# Altium footprint library DioneyaMain.PcbLib: 29 footprints (part 1 of 2)
Each footprint in its own frame and in the unit in brackets; x right, y up, seen from the top. Pads: shape width x height; smd on the part's side, far side on the other; paste and mask are expansions set on the pad; w line width, h text height; cw(c..) or ccw(c..) is an arc to the next point about the centre after c.
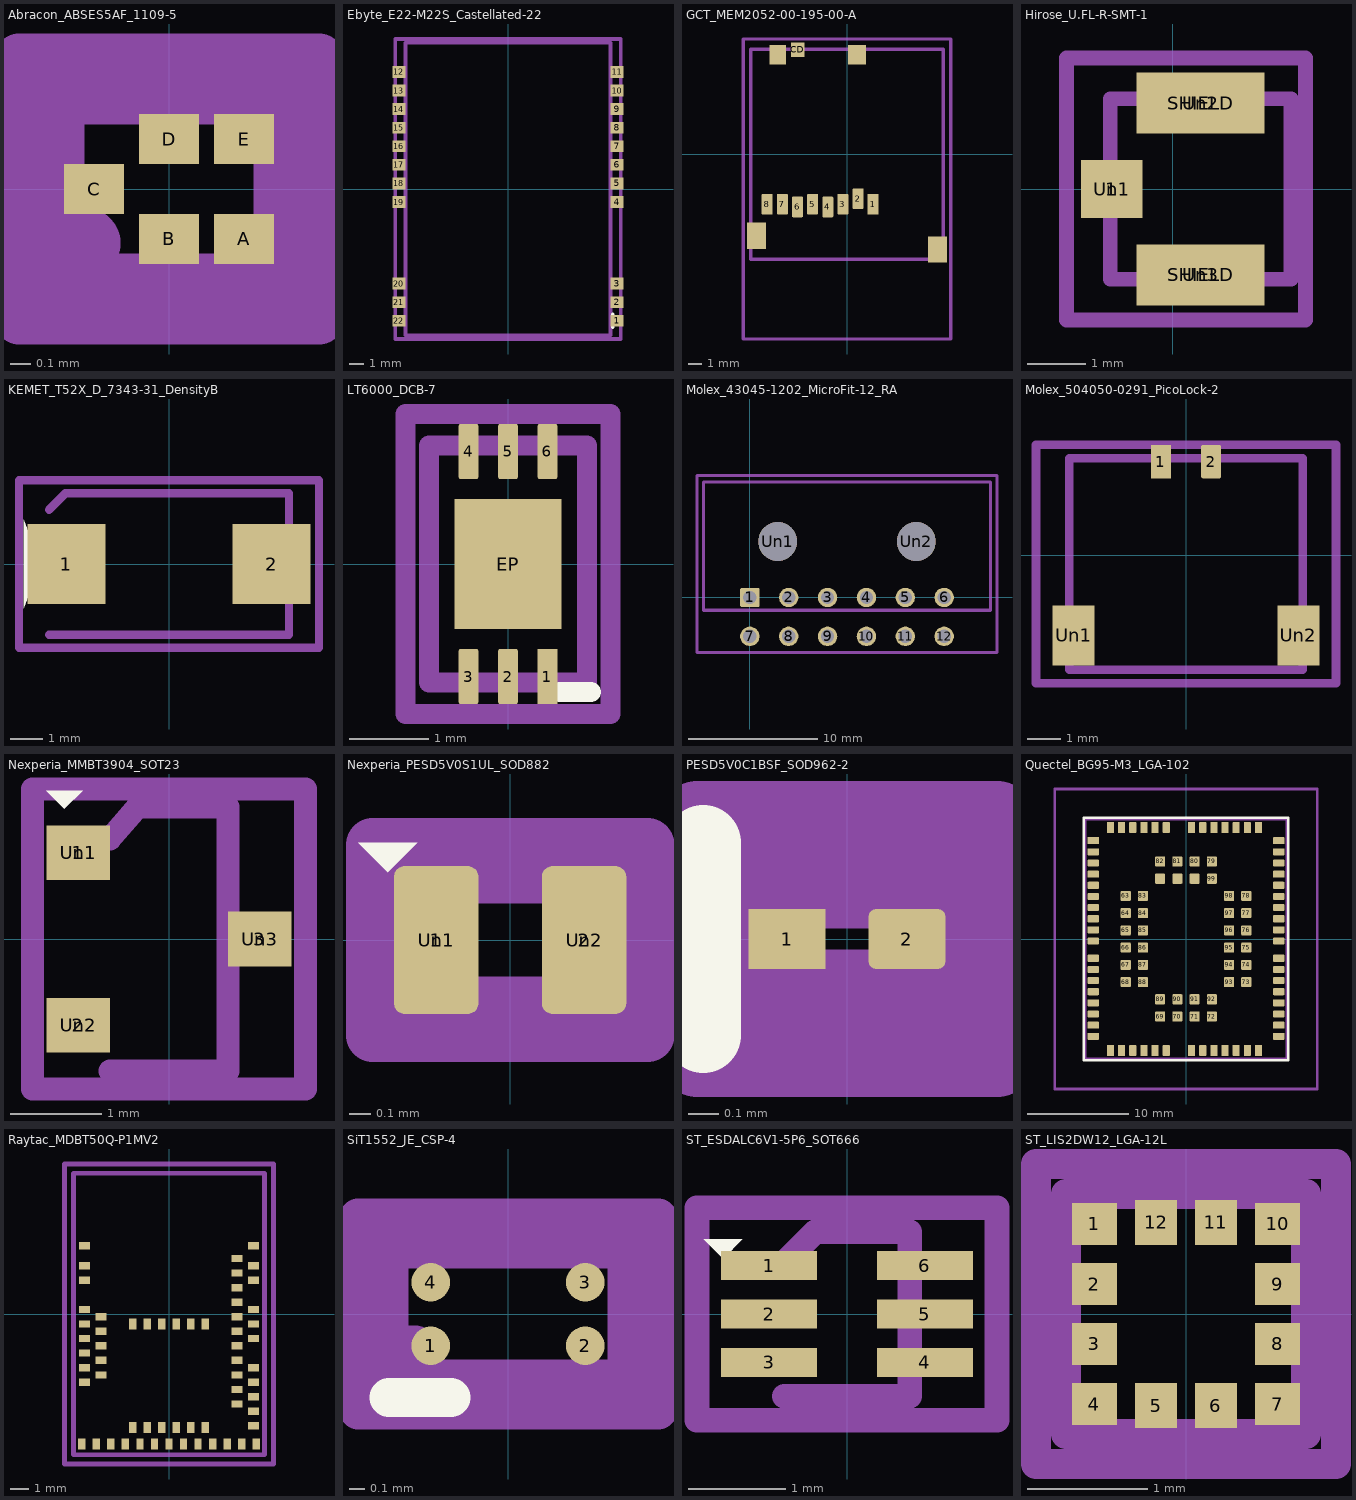
[diagram p0: the footprints below, top view; thin cyan lines are the x and y axes]

## Abracon_ABSES5AF_1109-5 [mm]
pads (5):
  rect 0.3x0.25 smd: A(0.375,-0.25) B(0,-0.25) C(-0.375,0) D(0,0.25) E(0.375,0.25)
F.Fab:
  circle w0.254: c-0.42,-0.27 r0.05
  region: -0.382,-0.232 -0.366,-0.27 -0.382,-0.308 -0.42,-0.324 -0.458,-0.308 -0.474,-0.27 -0.458,-0.232 -0.42,-0.216
  lines w0.254: -0.55,-0.45 -0.55,0.45 0.55,0.45 0.55,-0.45 -0.55,-0.45
F.CrtYd:
  lines w0.254: -0.75,-0.65 -0.75,0.65 0.75,0.65 0.75,-0.65 -0.75,-0.65

## Ebyte_E22-M22S_Castellated-22 [mm]
pads (22):
  rect 0.9x0.8 smd: 1(7.45,-9) 2(7.45,-7.73) 3(7.45,-6.46) 4(7.45,-0.89) 5(7.45,0.38) 6(7.45,1.65) 7(7.45,2.92) 8(7.45,4.19) 9(7.45,5.46) 10(7.45,6.73) 11(7.45,8) 12(-7.45,8) 13(-7.45,6.73) 14(-7.45,5.46) 15(-7.45,4.19) 16(-7.45,2.92) 17(-7.45,1.65) 18(-7.45,0.38) 19(-7.45,-0.89) 20(-7.45,-6.46) 21(-7.45,-7.73) 22(-7.45,-9)
F.SilkS:
  lines w0.254: 7.15,-9.45 7.15,-8.55
F.Fab:
  lines w0.254: -7,-10 -7,10 7,10 7,-10 -7,-10
F.CrtYd:
  lines w0.254: -7.7,-10.25 -7.7,10.25 7.7,10.25 7.7,-10.25 -7.7,-10.25

## GCT_MEM2052-00-195-00-A [mm]
pads (13):
  rect 0.8x1.5 smd: 1(1.905,-3.635)
  rrect20% 0.8x1.5 smd: 2(0.805,-3.235) 3(-0.295,-3.635) 4(-1.395,-3.835) 5(-2.495,-3.635) 6(-3.595,-3.835) 7(-4.695,-3.635) 8(-5.795,-3.635)
  rect 1x1.04 smd: CD(-3.585,7.595)
  rect 1.4x1.9 smd: SHIELD(-6.575,-5.925) SHIELD(6.575,-6.925)
  rect 1.2x1.4 smd: SHIELD(-5.035,7.225)
  rect 1.3x1.4 smd: SHIELD(0.715,7.225)
F.Fab:
  lines w0.254: -7,-7.625 -7,7.625 7,7.625 7,-7.625 -7,-7.625
F.CrtYd:
  lines w0.254: -7.525,-13.425 -7.525,8.365 7.525,8.365 7.525,-13.425 -7.525,-13.425

## Hirose_U.FL-R-SMT-1 [mm]
pads (6):
  rect 1.05x1 smd: 1(-1.05,0)
  rect 2.2x1.05 smd: SHIELD(0.475,-1.475) SHIELD(0.475,1.475)
  rect 0.85x0.8 on Top Paste: Un1(-1.05,0)
  rect 2x0.9 on Top Paste: Un2(0.475,1.475) Un3(0.475,-1.475)
F.Fab:
  lines w0.254: -1.075,-1.55 -1.075,1.55 2.025,1.55 2.025,-1.55 -1.075,-1.55
F.CrtYd:
  lines w0.254: -1.825,-2.25 -1.825,2.25 2.275,2.25 2.275,-2.25 -1.825,-2.25

## KEMET_T52X_D_7343-31_DensityB [mm]
pads (2):
  rect 2.37x2.43 smd: 1(-3.12,0) 2(3.12,0)
F.SilkS:
  region: -3.92,0 -4.42,-1.35 -4.42,1.35
F.Fab:
  lines w0.254: -3.65,-2.15 3.65,-2.15 3.65,2.15 -3.15,2.15 -3.65,1.65
F.CrtYd:
  lines w0.254: -4.56,-2.55 -4.56,2.55 4.56,2.55 4.56,-2.55 -4.56,-2.55

## LT6000_DCB-7 [mm]
pads (7):
  rect 0.25x0.7 smd: 1(0.5,-1.425)
  rrect20% 0.25x0.7 smd: 2(0,-1.425) 3(-0.5,-1.425) 4(-0.5,1.425) 5(0,1.425) 6(0.5,1.425)
  rect 1.35x1.65 smd: EP(0,0)
F.SilkS:
  lines w0.254: 0.65,-1.62 1.05,-1.62
F.Fab:
  lines w0.254: -1,-1.5 -1,1.5 1,1.5 1,-1.5 -1,-1.5
F.CrtYd:
  lines w0.254: -1.3,-1.9 -1.3,1.9 1.3,1.9 1.3,-1.9 -1.3,-1.9

## Molex_43045-1202_MicroFit-12_RA [mm]
pads (14):
  rrect20% 1.5x1.5 hole 1.02: 1(0,0)
  round 1.5 hole 1.02: 2(3,0) 3(6,0) 4(9,0) 5(12,0) 6(15,0) 7(0,-3) 8(3,-3) 9(6,-3) 10(9,-3) 11(12,-3) 12(15,-3)
  round 3 hole 3: Un1(2.15,4.32) Un2(12.85,4.32)
F.Fab:
  lines w0.254: -3.575,-0.99 -3.575,8.92 18.575,8.92 18.575,-0.99 -3.575,-0.99
F.CrtYd:
  lines w0.254: -4.08,-4.25 -4.08,9.42 19.08,9.42 19.08,-4.25 -4.08,-4.25

## Molex_504050-0291_PicoLock-2 [mm]
pads (4):
  rect 0.6x1 smd: 1(-0.75,2.795)
  rrect20% 0.6x1 smd: 2(0.75,2.795)
  rect 1.25x1.8 smd: Un1(-3.355,-2.395) Un2(3.355,-2.395)
F.Fab:
  lines w0.254: -3.485,-3.425 -3.485,2.895 3.485,2.895 3.485,-3.425 -3.485,-3.425
F.CrtYd:
  lines w0.254: -4.48,-3.82 -4.48,3.3 4.48,3.3 4.48,-3.82 -4.48,-3.82

## Nexperia_MMBT3904_SOT23 [mm]
pads (6):
  rect 0.7x0.6 smd: 1(-1,0.95) 2(-1,-0.95) 3(1,0)
  rect 0.6x0.5 on Top Paste: Un1(-1,0.95) Un2(-1,-0.95) Un3(1,0)
F.SilkS:
  region: -1.15,1.43 -1.35,1.63 -0.95,1.63
F.Fab:
  lines w0.254: -0.65,-1.45 0.65,-1.45 0.65,1.45 -0.35,1.45 -0.65,1.1
F.CrtYd:
  lines w0.254: -1.5,-1.65 -1.5,1.65 1.5,1.65 1.5,-1.65 -1.5,-1.65

## Nexperia_PESD5V0S1UL_SOD882 [mm]
pads (4):
  rrect25% 0.4x0.7 smd: 1(-0.35,0) 2(0.35,0)
  rrect33% 0.3x0.6 on Top Paste: Un1(-0.35,0) Un2(0.35,0)
F.SilkS:
  region: -0.58,0.32 -0.72,0.46 -0.44,0.46
F.Fab:
  lines w0.254: -0.5,-0.3 0.5,-0.3 0.5,0.3 -0.5,0.3
F.CrtYd:
  lines w0.254: -0.65,-0.45 -0.65,0.45 0.65,0.45 0.65,-0.45 -0.65,-0.45

## PESD5V0C1BSF_SOD962-2 [mm]
pads (2):
  rect 0.256x0.2 smd: 1(-0.2,0)
  rrect25% 0.256x0.2 smd: 2(0.2,0)
F.SilkS:
  lines w0.254: -0.48,-0.32 -0.48,0.32
F.Fab:
  lines w0.254: -0.312,-0.162 -0.312,0.162 0.312,0.162 0.312,-0.162 -0.312,-0.162
F.CrtYd:
  lines w0.254: -0.5,-0.4 -0.5,0.4 0.5,0.4 0.5,-0.4 -0.5,-0.4

## Quectel_BG95-M3_LGA-102 [mm]
pads (102):
  rect 1.1x0.7 smd: 1(-9.15,9.7)
  rrect20% 1.1x0.7 smd: 2(-9.15,8.6) 3(-9.15,7.5) 4(-9.15,6.4) 5(-9.15,5.3) 6(-9.15,4.2) 7(-9.15,3.1) 8(-9.15,2) 9(-9.15,0.9) 10(-9.15,-0.2) 11(-9.15,-1.9) 12(-9.15,-3) 13(-9.15,-4.1) 14(-9.15,-5.2) 15(-9.15,-6.3) 16(-9.15,-7.4) 17(-9.15,-8.5) 18(-9.15,-9.6) 32(9.15,-9.6) 33(9.15,-8.5) 34(9.15,-7.4) 35(9.15,-6.3) 36(9.15,-5.2) 37(9.15,-4.1) 38(9.15,-3) 39(9.15,-1.9) 40(9.15,-0.2) 41(9.15,0.9) 42(9.15,2) 43(9.15,3.1) 44(9.15,4.2) 45(9.15,5.3) 46(9.15,6.4) 47(9.15,7.5) 48(9.15,8.6) 49(9.15,9.7)
  rrect20% 0.7x1.1 smd: 19(-7.45,-11) 20(-6.35,-11) 21(-5.25,-11) 22(-4.15,-11) 23(-3.05,-11) 24(-1.95,-11) 25(0.55,-11) 26(1.65,-11) 27(2.75,-11) 28(3.85,-11) 29(4.95,-11) 30(6.05,-11) 31(7.15,-11) 50(7.15,11) 51(6.05,11) 52(4.95,11) 53(3.85,11) 54(2.75,11) 55(1.65,11) 56(0.55,11) 57(-1.95,11) 58(-3.05,11) 59(-4.15,11) 60(-5.25,11) 61(-6.35,11) 62(-7.45,11)
  rrect20% 1x1 smd: 63(-5.95,4.25) 64(-5.95,2.55) 65(-5.95,0.85) 66(-5.95,-0.85) 67(-5.95,-2.55) 68(-5.95,-4.25) 69(-2.55,-7.65) 70(-0.85,-7.65) 71(0.85,-7.65) 72(2.55,-7.65) 73(5.95,-4.25) 74(5.95,-2.55) 75(5.95,-0.85) 76(5.95,0.85) 77(5.95,2.55) 78(5.95,4.25) 79(2.55,7.65) 80(0.85,7.65) 81(-0.85,7.65) 82(-2.55,7.65) 83(-4.25,4.25) 84(-4.25,2.55) 85(-4.25,0.85) 86(-4.25,-0.85) 87(-4.25,-2.55) 88(-4.25,-4.25) 89(-2.55,-5.95) 90(-0.85,-5.95) 91(0.85,-5.95) 92(2.55,-5.95) 93(4.25,-4.25) 94(4.25,-2.55) 95(4.25,-0.85) 96(4.25,0.85) 97(4.25,2.55) 98(4.25,4.25) 99(2.55,5.95) 100(0.85,5.95) 101(-0.85,5.95) 102(-2.55,5.95)
F.SilkS:
  lines w0.254: -10.1,-11.95 -10.1,11.95 10.1,11.95 10.1,-11.95 -10.1,-11.95
F.Fab:
  lines w0.254: -9.95,-11.8 -9.95,11.8 9.95,11.8 9.95,-11.8 -9.95,-11.8
F.CrtYd:
  lines w0.254: -12.95,-14.8 -12.95,14.8 12.95,14.8 12.95,-14.8 -12.95,-14.8

## Raytac_MDBT50Q-P1MV2 [mm]
pads (61):
  rect 0.6x0.4 smd: 1(-4.65,3.75) 2(-4.65,2.65) 3(-4.65,1.85) 4(-4.65,0.25) 5(-3.75,-0.15) 6(-4.65,-0.55) 7(-3.75,-0.95) 8(-4.65,-1.35) 9(-3.75,-1.75) 10(-4.65,-2.15) 11(-3.75,-2.55) 12(-4.65,-2.95) 13(-3.75,-3.35) 14(-4.65,-3.75) 34(4.65,-6.15) 35(4.65,-5.35) 36(3.75,-4.95) 37(4.65,-4.55) 38(3.75,-4.15) 39(4.65,-3.75) 40(3.75,-3.35) 41(4.65,-2.95) 42(3.75,-2.55) 43(3.75,-1.75) 44(4.65,-1.35) 45(3.75,-0.95) 46(4.65,-0.55) 47(3.75,-0.15) 48(4.65,0.25) 49(3.75,0.65) 50(3.75,1.45) 51(4.65,1.85) 52(3.75,2.25) 53(4.65,2.65) 54(3.75,3.05) 55(4.65,3.75)
  rect 0.4x0.6 smd: 15(-4.8,-7.15) 16(-4,-7.15) 17(-3.2,-7.15) 18(-2.4,-7.15) 19(-2,-6.25) 20(-1.6,-7.15) 21(-1.2,-6.25) 22(-0.8,-7.15) 23(-0.4,-6.25) 24(0,-7.15) 25(0.4,-6.25) 26(0.8,-7.15) 27(1.2,-6.25) 28(1.6,-7.15) 29(2,-6.25) 30(2.4,-7.15) 31(3.2,-7.15) 32(4,-7.15) 33(4.8,-7.15) 56(-2,-0.55) 57(-1.2,-0.55) 58(-0.4,-0.55) 59(0.4,-0.55) 60(1.2,-0.55) 61(2,-0.55)
F.Fab:
  lines w0.254: -5.25,-7.75 -5.25,7.75 5.25,7.75 5.25,-7.75 -5.25,-7.75
F.CrtYd:
  lines w0.254: -5.75,-8.25 -5.75,8.25 5.75,8.25 5.75,-8.25 -5.75,-8.25

## SiT1552_JE_CSP-4 [mm]
pads (4):
  round 0.25 smd: 1(-0.5,-0.205) 2(0.5,-0.205) 3(0.5,0.205) 4(-0.5,0.205)
F.SilkS:
  lines w0.254: -0.77,-0.54 -0.37,-0.54
F.Fab:
  circle w0.254: c-0.61,-0.25 r0.05
  region: -0.572,-0.212 -0.556,-0.25 -0.572,-0.288 -0.61,-0.304 -0.648,-0.288 -0.664,-0.25 -0.648,-0.212 -0.61,-0.196
  lines w0.254: -0.77,-0.42 -0.77,0.42 0.77,0.42 0.77,-0.42 -0.77,-0.42
F.CrtYd:
  lines w0.254: -0.97,-0.62 -0.97,0.62 0.97,0.62 0.97,-0.62 -0.97,-0.62

## ST_ESDALC6V1-5P6_SOT666 [mm]
pads (6):
  rect 0.99x0.3 smd: 1(-0.805,0.5) 2(-0.805,0) 3(-0.805,-0.5) 4(0.805,-0.5) 5(0.805,0) 6(0.805,0.5)
F.SilkS:
  region: -1.28,0.57 -1.48,0.77 -1.08,0.77
F.Fab:
  lines w0.254: -0.65,-0.85 0.65,-0.85 0.65,0.85 -0.33,0.85 -0.65,0.53
F.CrtYd:
  lines w0.254: -1.55,-1.1 -1.55,1.1 1.55,1.1 1.55,-1.1 -1.55,-1.1

## ST_LIS2DW12_LGA-12L [mm]
pads (12):
  rect 0.375x0.35 smd: 1(-0.763,0.75) 2(-0.763,0.25) 3(-0.763,-0.25) 4(-0.763,-0.75) 7(0.763,-0.75) 8(0.763,-0.25) 9(0.763,0.25) 10(0.763,0.75)
  rect 0.35x0.375 smd: 5(-0.25,-0.763) 6(0.25,-0.763) 11(0.25,0.763) 12(-0.25,0.763)
F.Fab:
  lines w0.254: -1,-1 -1,1 1,1 1,-1 -1,-1
F.CrtYd:
  lines w0.254: -1.25,-1.25 -1.25,1.25 1.25,1.25 1.25,-1.25 -1.25,-1.25